# Altium footprint library Cole_.PcbLib: 175 footprints (part 9 of 11)
Each footprint in its own frame and in the unit in brackets; x right, y up, seen from the top. Pads: shape width x height; smd on the part's side, far side on the other; paste and mask are expansions set on the pad; w line width, h text height; cw(c..) or ccw(c..) is an arc to the next point about the centre after c.
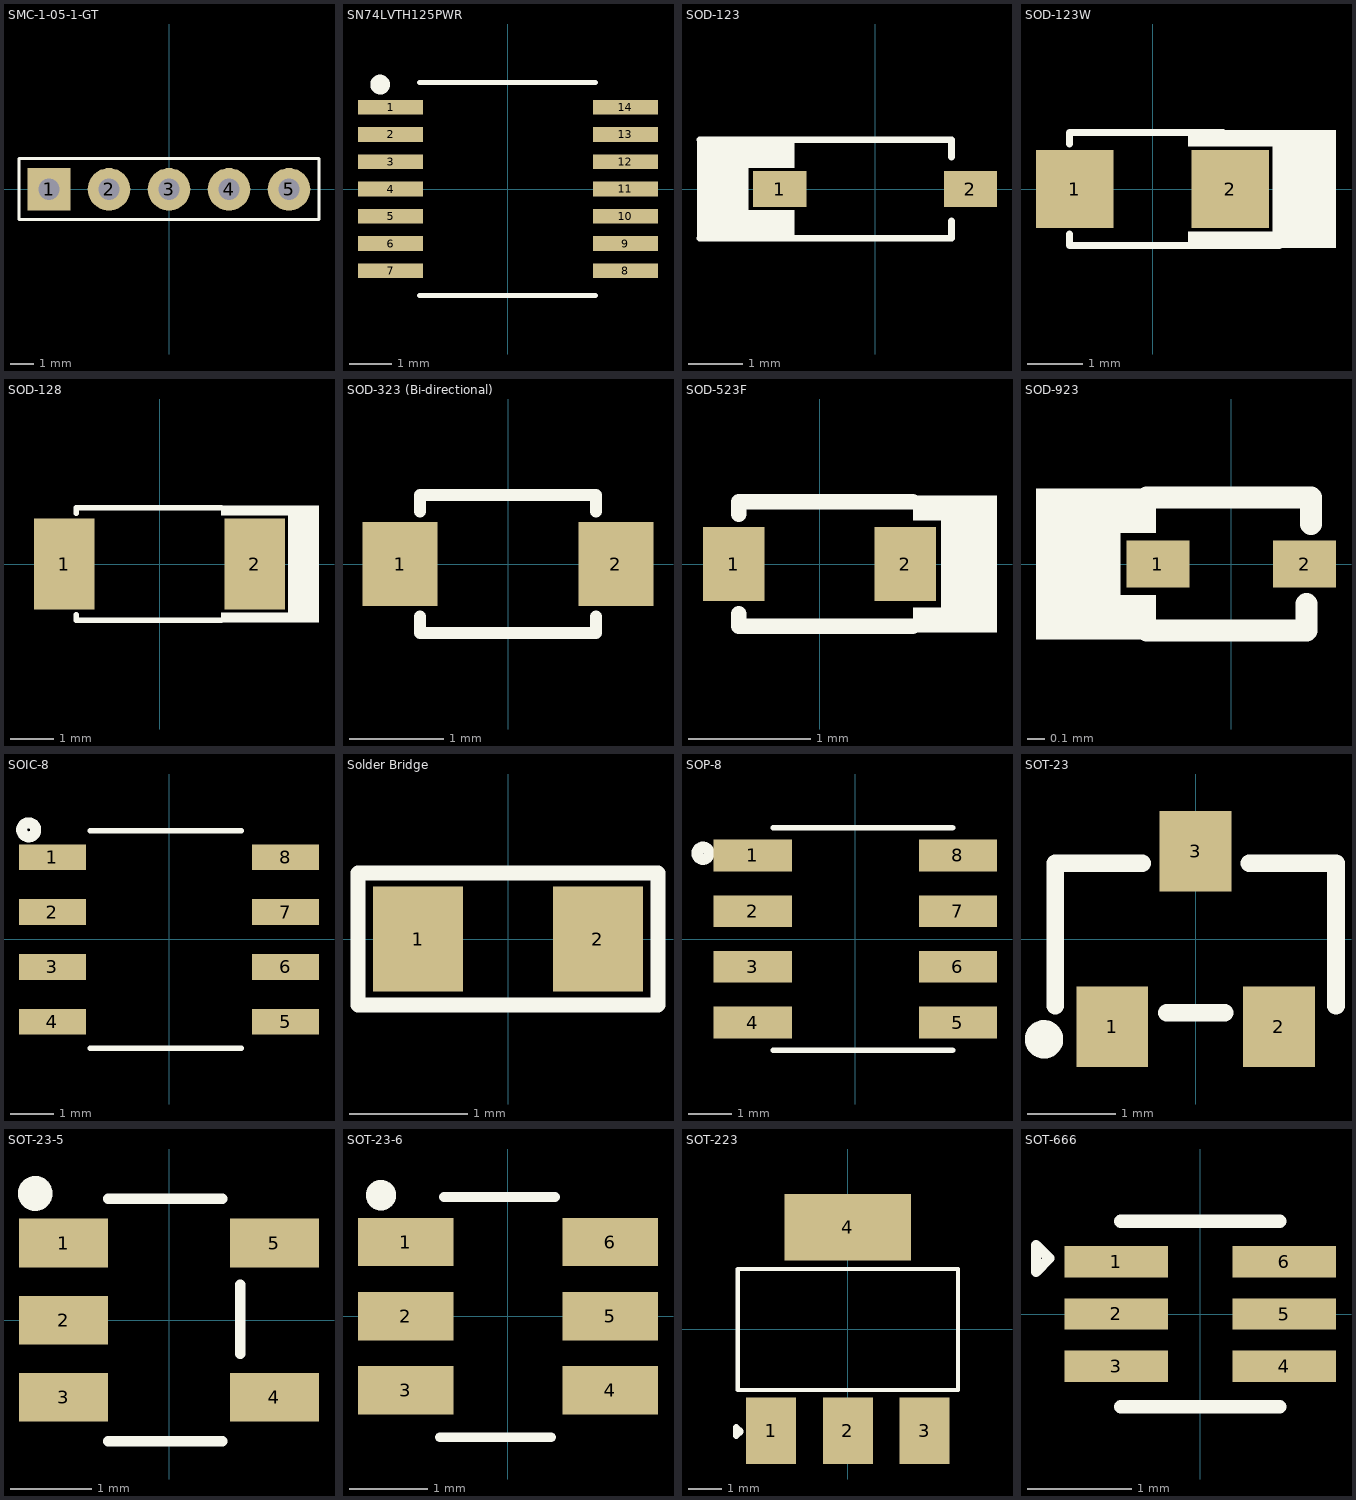
[diagram p8: the footprints below, top view; thin cyan lines are the x and y axes]

## SMC-1-05-1-GT [mm]
pads (5):
  rect 1.8x1.8 hole 0.9: 1(-5.08,0)
  round 1.8 hole 0.9: 2(-2.54,0) 3(0,0) 4(2.54,0) 5(5.08,0)
Top Overlay:
  lines w0.127: -6.35,-1.27 -6.35,1.295 6.35,1.295 6.35,-1.27 -6.35,-1.27
3D body "socket_aw127-05z_-hp.stp": height 7, standoff -3, extent -6.325,-1.283 6.375,1.257

## SN74LVTH125PWR [mm]
pads (14):
  rect 1.55x0.35 smd: 1(-2.8,1.95) 2(-2.8,1.3) 3(-2.8,0.65) 4(-2.8,0) 5(-2.8,-0.65) 6(-2.8,-1.3) 7(-2.8,-1.95) 8(2.8,-1.95) 9(2.8,-1.3) 10(2.8,-0.65) 11(2.8,0) 12(2.8,0.65) 13(2.8,1.3) 14(2.8,1.95)
Top Overlay:
  circle w0.254: c-3.048,2.489 r0.108
  lines w0.127: -2.108,-2.54 2.083,-2.54 ; -2.108,2.54 2.083,2.54
3D body "User Library-TSSOP-14.STEP": height 1.2, standoff 0, extent -3.2,-2.5 3.2,2.5

## SOD-123 [mm] "DIODE SCHOTTKY 100V 150MA SOD123"
pads (2):
  rect 0.97x0.65 smd: 1(-1.74,0) 2(1.74,0)
Top Overlay:
  rectangle: -3.251,-0.864 -2.311,0.924
  rectangle: -2.362,0.381 -1.473,0.924
  rectangle: -2.362,-0.924 -1.473,-0.381
  lines w0.127: -3.2,-0.899 1.397,-0.899 1.397,-0.584 ; -3.2,0.899 1.397,0.899 1.397,0.584
3D body "SOD-123_STM.step": height 1.44, standoff -0.01, extent -1.981,-0.851 1.981,0.851

## SOD-123W [mm] "DIODE SCHOTTKY 30V 1A SOD123W"
pads (2):
  rect 1.4x1.4 smd: 1(-1.4,0) 2(1.4,0)
Top Overlay:
  region: 2.286,1.067 0.635,1.067 0.635,0.762 2.286,0.762
  region: 2.286,-0.762 0.635,-0.762 0.635,-1.067 2.286,-1.067
  region: 3.302,1.067 2.159,1.067 2.159,-1.067 3.302,-1.067
  lines w0.127: -1.499,-0.813 -1.499,-1.016 2.286,-1.016 ; -1.499,0.813 -1.499,1.016 -1.143,1.016 1.27,1.016
3D body "User Library-SOD123W.step": height 1.1, standoff -0.01, extent -2,-0.95 2,0.95

## SOD-128 [mm]
pads (2):
  rect 1.4x2.1 smd: 1(-2.2,0) 2(2.2,0)
Top Overlay:
  rectangle: 1.422,-1.346 3.683,-1.118
  rectangle: 2.972,-1.295 3.683,1.143
  rectangle: 1.422,1.118 3.683,1.346
  lines w0.127: -1.93,-1.168 -1.93,-1.295 1.422,-1.295 ; -1.93,1.168 -1.93,1.295 1.422,1.295
3D body "User Library-SOD-128Flat.step": height 1.02, standoff 0, extent -2.4,-1.25 2.4,1.25

## SOD-323 (Bi-directional) [mm]
pads (2):
  rect 0.8x0.9 smd mask+0.055: 1(-1.15,0) 2(1.15,0)
Top Overlay:
  lines w0.127: -0.94,-0.737 -0.94,-0.559 ; -0.94,0.559 -0.94,0.737 ; -0.914,-0.737 0.94,-0.737 0.94,-0.559 ; -0.914,0.737 0.94,0.737 0.94,0.559
3D body "User Library-SOD323-1.step": height 1.1, standoff 0, extent -1.3,-0.675 1.3,0.675

## SOD-523F [mm]
pads (2):
  rect 0.5x0.6 smd: 1(-0.7,0) 2(0.7,0)
Top Overlay:
  rectangle: 0.991,-0.406 1.448,0.559
  rectangle: 0.762,-0.559 1.448,-0.356
  rectangle: 0.762,0.356 1.448,0.559
  lines w0.127: -0.66,-0.406 -0.66,-0.508 0.762,-0.508 ; -0.66,0.406 -0.66,0.508 0.762,0.508
3D body "User Library-SOD523F.step": height 0.7, standoff 0, extent -0.85,-0.45 0.85,0.45

## SOD-923 [mm]
pads (2):
  rect 0.36x0.27 smd: 1(-0.42,0) 2(0.42,0)
Top Overlay:
  rectangle: -1.118,0.178 -0.432,0.432
  rectangle: -1.118,-0.432 -0.432,-0.178
  rectangle: -1.118,-0.432 -0.635,0.432
  lines w0.127: -0.483,-0.381 0.432,-0.381 0.432,-0.229 ; -0.483,0.381 0.457,0.381 0.457,0.229
3D body "User Library-DIODE_SOD-923.step": height 0.43, standoff 0, extent -0.525,-0.325 0.525,0.325

## SOIC-8 [mm]
pads (8):
  rect 1.55x0.6 smd: 1(-2.7,1.905) 2(-2.7,0.635) 3(-2.7,-0.635) 4(-2.7,-1.905) 5(2.7,-1.905) 6(2.7,-0.635) 7(2.7,0.635) 8(2.7,1.905)
Top Overlay:
  circle w0.254: c-3.251,2.54 r0.163
  lines w0.127: -1.829,-2.515 1.676,-2.515 ; -1.829,2.515 1.676,2.515
3D body "User Library-SOIC-8-1.STEP": height 1.7, standoff -0.05, extent -3,-2.45 3,2.45

## Solder Bridge [mil] "Solder Bridge ON"
pads (2):
  rect 30x35 smd: 1(-30,0) 2(30,0)
Top Overlay:
  lines w5: -50,-22 50,-22 50,22 -50,22 -50,-22

## SOP-8 [mm]
pads (8):
  rect 1.78x0.72 smd: 1(-2.34,1.905) 2(-2.34,0.635) 3(-2.34,-0.635) 4(-2.34,-1.905) 5(2.34,-1.905) 6(2.34,-0.635) 7(2.34,0.635) 8(2.34,1.905)
Top Overlay:
  circle w0.254: c-3.475,1.956 r0.137
  lines w0.127: -1.874,-2.54 2.215,-2.54 ; -1.874,2.54 2.215,2.54
3D body "SOP-8L_DIO.step": height 1.75, standoff 0, extent -3.125,-2.475 3.125,2.475

## SOT-23 [mm] "TRANS NPN 40V 0.6A SOT23"
pads (3):
  rect 0.82x0.92 smd: 1(-0.95,-1) 2(0.95,-1) 3(0,1)
Top Overlay:
  circle w0.254: c-1.727,-1.143 r0.092
  lines w0.2: -1.6,-0.762 -1.6,0.864 -0.61,0.864 ; -0.33,-0.838 0.33,-0.838 ; 0.61,0.864 1.6,0.864 1.6,-0.762
3D body "CircuitWorks-SOT-23.step": height 1.05, standoff -0.05, extent -1.5,-1.25 1.5,1.25

## SOT-23-5 [mm]
pads (5):
  rect 1.1x0.6 smd: 1(-1.3,0.95) 2(-1.3,0) 3(-1.3,-0.95) 4(1.3,-0.95) 5(1.3,0.95)
Top Overlay:
  circle w0.254: c-1.65,1.562 r0.088
  lines w0.127: -0.748,-1.496 0.66,-1.496 ; -0.748,1.496 0.66,1.496 ; 0.88,-0.418 0.88,0.44
3D body "SN74LV1T34DBVR.STEP": height 1.45, standoff 0, extent -1.4,-1.45 1.4,1.45

## SOT-23-6 [mm] "IC OPAMP GP 1 CIRCUIT SOT23-6"
pads (6):
  rect 1.22x0.62 smd: 1(-1.31,0.95) 2(-1.31,0) 3(-1.31,-0.95) 4(1.31,-0.95) 5(1.31,0) 6(1.31,0.95)
Top Overlay:
  circle w0.254: c-1.626,1.549 r0.068
  lines w0.127: -0.872,-1.549 0.55,-1.549 ; -0.821,1.524 0.601,1.524
3D body "21-0058I_MXM.step": height 1.47, standoff 0.02, extent -1.499,-1.499 1.499,1.499

## SOT-223 [mm]
pads (4):
  rect 1.5x2 smd: 1(-2.3,-3.05) 2(0,-3.05) 3(2.3,-3.05)
  rect 3.8x2 smd: 4(0,3.05)
Top Overlay:
  lines w0.127: -3.302,-1.829 -3.302,1.803 3.302,1.803 3.302,-1.829 -3.302,-1.829
  lines w0.2: -3.353,-3.2 -3.353,-2.946 -3.226,-3.073 -3.353,-3.2
3D body "User Library-SOT-223-1.step": height 1.61, standoff -0.04, extent -3.25,-3.5 3.25,3.5

## SOT-666 [mm]
pads (6):
  rect 0.99x0.3 smd: 1(-0.805,0.5) 2(-0.805,0) 3(-0.805,-0.5) 4(0.805,-0.5) 5(0.805,0) 6(0.805,0.5)
Top Overlay:
  lines w0.1: -1.575,0.406 -1.448,0.533 -1.575,0.66 -1.575,0.406
  lines w0.127: -0.762,-0.889 0.762,-0.889 ; -0.762,0.889 0.762,0.889
3D body "SOT-666_STM.step": height 0.64, standoff 0, extent -0.851,-0.851 0.851,0.851